# Altium integrated library LM66100DCKT.IntLib: 1 symbol
Pins are listed as number, name and electrical type; pins without a type are passive.

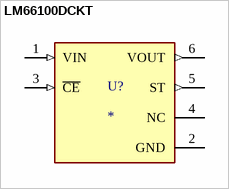
[diagram p0: symbol LM66100DCKT]

## LM66100DCKT
designator U?
1.5-V to 5.5-V, 1.5-A, 0.5-ÂµA IQ ideal diode with integrated FET; MF: Texas Instruments; MP: LM66100DCKT; SnapEDA_Link: https://www.snapeda.com/parts/LM66100DCKT/Texas+Instruments/view-part/?ref=snap; Package: SOT-SC70-6 Texas Instruments; Value: *; Check_prices: https://www.snapeda.com/parts/LM66100DCKT/Texas+Instruments/view-part/?ref=eda
footprint SOT65P210X110-6N
pins: 1 VIN (in), 2 GND (power), 3 ~{CE} (in), 4 NC, 5 ST (out), 6 VOUT (out)